# Altium integrated library BQ25895RTWR.IntLib: 1 symbol
Pins are listed as number, name and electrical type; pins without a type are passive.

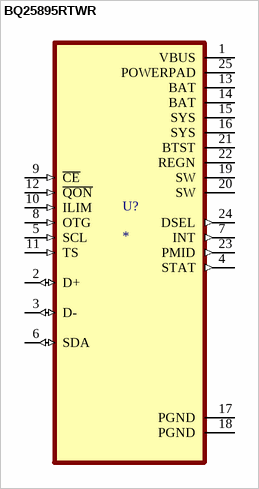
[diagram p0: symbol BQ25895RTWR]

## BQ25895RTWR
designator U?
I2C 1cell 5A buck battery charger with high input voltage and 3.1-A boost with HVDCP enabled; MF: Texas Instruments; MP: BQ25895RTWR; SnapEDA_Link: https://www.snapeda.com/parts/BQ25895RTWR/Texas+Instruments/view-part/?ref=snap; Package: WQFN-24 Texas Instruments; Value: *; Check_prices: https://www.snapeda.com/parts/BQ25895RTWR/Texas+Instruments/view-part/?ref=eda
footprint QFN50P400X400X80-25N
pins: 1 VBUS (power), 2 D+ (io), 3 D- (io), 4 STAT (out), 5 SCL (in), 6 SDA (io), 7 INT (out), 8 OTG (in), 9 ~{CE} (in), 10 ILIM (in), 11 TS (in), 12 ~{QON} (in), 13 BAT (power), 14 BAT (power), 15 SYS (power), 16 SYS (power), 17 PGND (power), 18 PGND (power), 19 SW (power), 20 SW (power), 21 BTST (power), 22 REGN (power), 23 PMID (out), 24 DSEL (out), 25 POWERPAD (power)